# Altium schematic symbol library AP2553AFDC-7.SchLib: 1 symbol
Pins are listed as number, name and electrical type; pins without a type are passive.

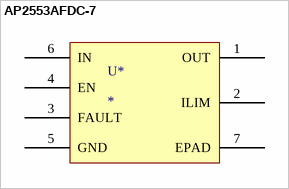
[diagram p0: symbol AP2553AFDC-7]

## AP2553AFDC-7
designator U*
AP2553AFDC-7
footprint AP2553AFDC-7
pins: 1 OUT, 2 ILIM, 3 FAULT, 4 EN, 5 GND, 6 IN, 7 EPAD